# Altium footprint library PrzejścieTHT10.PcbLib: 1 footprints
Each footprint in its own frame and in the unit in brackets; x right, y up, seen from the top. Pads: shape width x height; smd on the part's side, far side on the other; paste and mask are expansions set on the pad; w line width, h text height; cw(c..) or ccw(c..) is an arc to the next point about the centre after c.
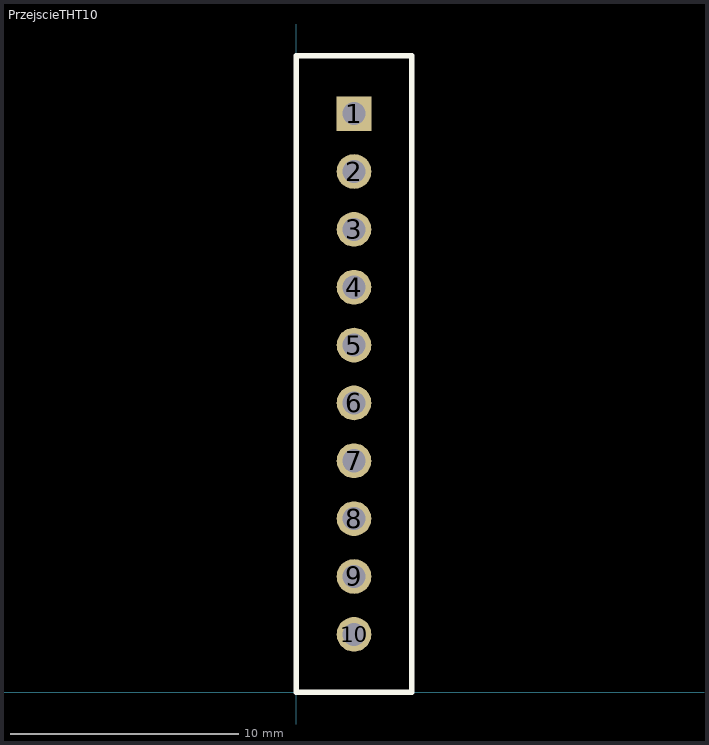
[diagram p0: the footprint, top view; thin cyan lines are the x and y axes]

## PrzejscieTHT10 [mil]
pads (10):
  rect 60x60 hole 40: 1(100,1000)
  round 60 hole 40: 2(100,900) 3(100,800) 4(100,700) 5(100,600) 6(100,500) 7(100,400) 8(100,300) 9(100,200) 10(100,100)
Top Overlay:
  lines w10: 0,0 0,1100 200,1100 200,0 0,0